# Altium footprint library FootPrintLib_0.PcbLib: 266 footprints (part 14 of 17)
Each footprint in its own frame and in the unit in brackets; x right, y up, seen from the top. Pads: shape width x height; smd on the part's side, far side on the other; paste and mask are expansions set on the pad; w line width, h text height; cw(c..) or ccw(c..) is an arc to the next point about the centre after c.
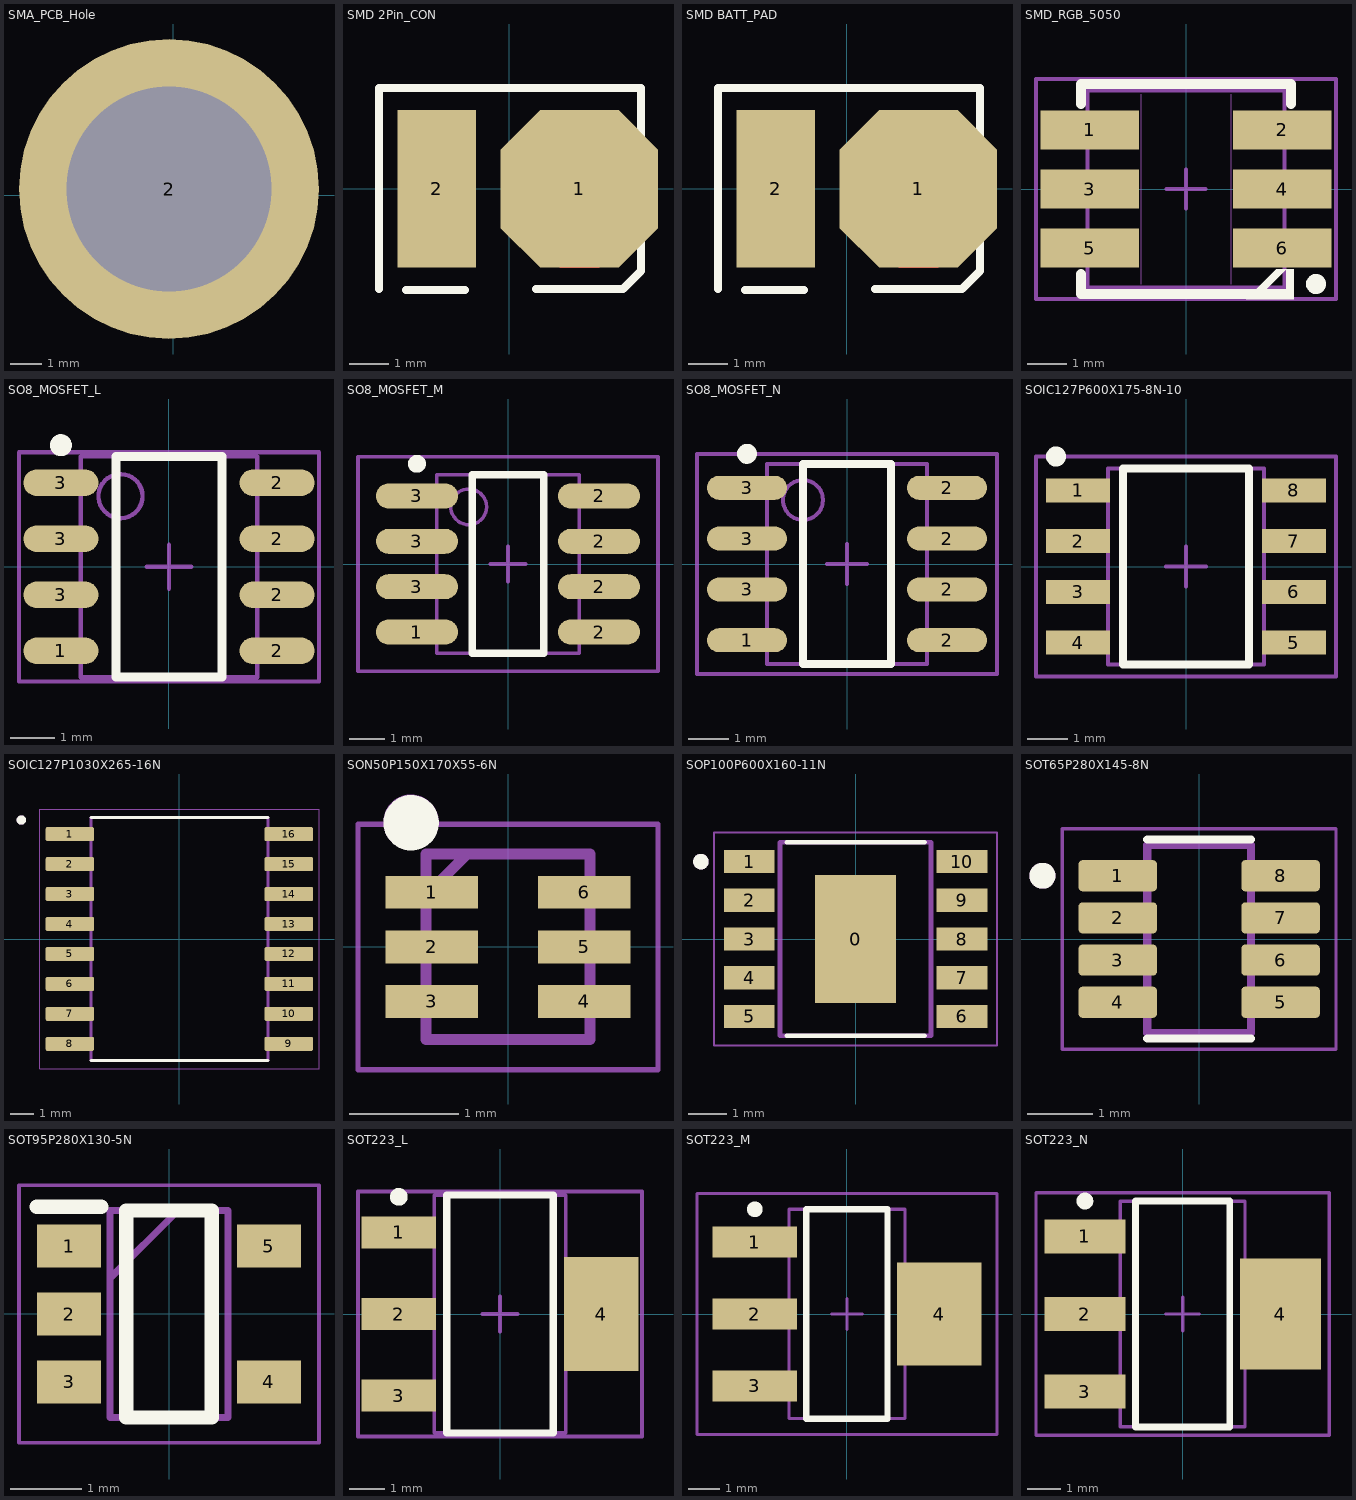
[diagram p13: the footprints below, top view; thin cyan lines are the x and y axes]

## SMA_PCB_Hole [mm]
height 5
pads (1):
  round 9.5 hole 6.5: 2(-0.127,0.203)

## SMD 2Pin_CON [mm]
pads (2):
  oct 4x4 smd: 1(1.784,0)
  rect 2x4 smd: 2(-1.835,0)
Top Layer:
  region: 0.784,-1.5 1.284,-2 2.284,-2 2.784,-1.5 2.784,1.5 2.284,2 1.284,2 0.784,1.5
Top Overlay:
  lines w0.2: -3.302,-2.54 -3.302,2.562 3.353,2.562 3.353,-2.083 2.896,-2.54 0.686,-2.54 ; -2.616,-2.565 -1.118,-2.565
Mechanical 5:
  text "+" at 1.245,-0.737 h1.52

## SMD BATT_PAD [mm]
pads (2):
  oct 4x4 smd: 1(1.81,0)
  rect 2x4 smd: 2(-1.81,0)
Top Layer:
  region: 0.81,-1.5 1.31,-2 2.31,-2 2.81,-1.5 2.81,1.5 2.31,2 1.31,2 0.81,1.5
Top Overlay:
  lines w0.2: -3.277,-2.54 -3.277,2.562 3.378,2.562 3.378,-2.083 2.921,-2.54 0.711,-2.54 ; -2.591,-2.565 -1.092,-2.565
Mechanical 5:
  text "+" at 1.27,-0.737 h1.52

## SMD_RGB_5050 [mm]
pads (6):
  rect 2.5x1 smd: 1(-2.45,1.5) 2(2.45,1.5) 3(-2.45,0) 4(2.45,0) 5(-2.45,-1.5) 6(2.45,-1.5)
Top Overlay:
  circle w0.254: c3.302,-2.413 r0.127
  region: 1.524,-2.794 2.73,-2.794 2.73,-2.032 2.54,-2.032 2.54,-2.54 2.032,-2.54 2.54,-2.032 2.286,-2.032
  lines w0.254: -2.667,-2.159 -2.667,-2.667 1.778,-2.667 ; -2.667,2.159 -2.667,2.667 2.667,2.667 2.667,2.159
Mechanical 13:
  lines w0.02: -1.143,-2.413 -1.143,2.413 ; 1.143,-2.413 1.143,2.413
  lines w0.1: -2.5,-2.5 2.5,-2.5 2.5,2.5 -2.5,2.5 -2.5,-2.5
Mechanical 15:
  lines w0.1: -0.5,0 0.5,0 ; 0,-0.5 0,0.5 ; -3.81,-2.794 -3.81,2.794 3.81,2.794 3.81,-2.794 -3.81,-2.794
3D body "LED SMD 5050 RGB.stp": height 1.67, standoff 0.05, extent -2.741,-2.551 2.659,2.449

## SO8_MOSFET_L [mm] "8-Pin Small Outline Package (SO8), IPC High Density"
height 1.73
pads (8):
  oval 1.7x0.6 smd: 1(-2.45,-1.905) 2(2.45,-1.905) 2(2.45,-0.635) 2(2.45,0.635) 2(2.45,1.905) 3(-2.45,-0.635) 3(-2.45,0.635) 3(-2.45,1.905)
Top Overlay:
  circle w0.25: c-2.45,2.755 r0.125
  lines w0.2: -1.2,-2.5 1.2,-2.5 1.2,2.5 -1.2,2.5 -1.2,-2.5
Mechanical 13:
  circle w0.1: c-1.1,1.6 r0.5
  lines w0.1: -2,-2.5 2,-2.5 2,2.5 -2,2.5 -2,-2.5
Mechanical 15:
  lines w0.1: -0.5,0 0.5,0 ; 0,-0.5 0,0.5 ; -3.4,-2.6 3.4,-2.6 3.4,2.6 -3.4,2.6 -3.4,-2.6
3D body "SO8_narrow.step": height 1.7, standoff 0, extent -3.124,-2.388 3.073,2.438

## SO8_MOSFET_M [mm] "8-Pin Small Outline Package (SO8), IPC Low Density"
height 1.73
pads (8):
  oval 2.3x0.7 smd: 1(-2.55,-1.905) 2(2.55,-1.905) 2(2.55,-0.635) 2(2.55,0.635) 2(2.55,1.905) 3(-2.55,-0.635) 3(-2.55,0.635) 3(-2.55,1.905)
Top Overlay:
  circle w0.25: c-2.55,2.805 r0.125
  lines w0.2: -1,-2.5 1,-2.5 1,2.5 -1,2.5 -1,-2.5
Mechanical 13:
  circle w0.1: c-1.1,1.6 r0.5
  lines w0.1: -2,-2.5 2,-2.5 2,2.5 -2,2.5 -2,-2.5
Mechanical 15:
  lines w0.1: -0.5,0 0.5,0 ; 0,-0.5 0,0.5 ; -4.2,-3 4.2,-3 4.2,3 -4.2,3 -4.2,-3
3D body "SO8_narrow.step": height 1.7, standoff 0, extent -3.124,-2.388 3.073,2.438

## SO8_MOSFET_N [mm] "8-Pin Small Outline Package (SO8), IPC Medium Density"
height 1.73
pads (8):
  oval 2x0.6 smd: 1(-2.5,-1.905) 2(2.5,-1.905) 2(2.5,-0.635) 2(2.5,0.635) 2(2.5,1.905) 3(-2.5,-0.635) 3(-2.5,0.635) 3(-2.5,1.905)
Top Overlay:
  circle w0.25: c-2.5,2.755 r0.125
  lines w0.2: -1.1,-2.5 1.1,-2.5 1.1,2.5 -1.1,2.5 -1.1,-2.5
Mechanical 13:
  circle w0.1: c-1.1,1.6 r0.5
  lines w0.1: -2,-2.5 2,-2.5 2,2.5 -2,2.5 -2,-2.5
Mechanical 15:
  lines w0.1: -0.5,0 0.5,0 ; 0,-0.5 0,0.5 ; -3.75,-2.75 3.75,-2.75 3.75,2.75 -3.75,2.75 -3.75,-2.75
3D body "SO8_narrow.step": height 1.7, standoff 0, extent -3.124,-2.388 3.073,2.438

## SOIC127P600X175-8N-10 [mm] "SOIC,1.27mm pitch;8 pin,3.90mm W X 4.90mm L X 1.75mm H body"
height 1.75
pads (8):
  rect 1.6x0.6 smd paste+0 mask+0: 1(-2.7,1.905) 2(-2.7,0.635) 3(-2.7,-0.635) 4(-2.7,-1.905) 5(2.7,-1.905) 6(2.7,-0.635) 7(2.7,0.635) 8(2.7,1.905)
Top Overlay:
  circle w0.25: c-3.25,2.75 r0.125
  lines w0.2: -1.575,-2.45 -1.575,2.45 1.575,2.45 1.575,-2.45 -1.575,-2.45
Mechanical 3:
Mechanical 13:
  lines w0.1: -1.95,-2.45 -1.95,2.45 1.95,2.45 1.95,-2.45 -1.95,-2.45
Mechanical 15:
  lines w0.1: -0.5,0 0.5,0 ; 0,-0.5 0,0.5 ; -3.75,-2.75 -3.75,2.75 3.75,2.75 3.75,-2.75 -3.75,-2.75
3D body "DSO-8-16.stp": height 1.76, standoff 0, extent -3,-2.5 3,2.5

## SOIC127P1030X265-16N [mm]
pads (16):
  rrect25% 2.06x0.6 smd paste+0 mask+0.102: 1(-4.64,4.445) 2(-4.64,3.175) 3(-4.64,1.905) 4(-4.64,0.635) 5(-4.64,-0.635) 6(-4.64,-1.905) 7(-4.64,-3.175) 8(-4.64,-4.445) 9(4.64,-4.445) 10(4.64,-3.175) 11(4.64,-1.905) 12(4.64,-0.635) 13(4.64,0.635) 14(4.64,1.905) 15(4.64,3.175) 16(4.64,4.445)
Top Overlay:
  circle w0.2: c-6.7,5.045 r0.1
  lines w0.127: -3.75,-5.15 3.75,-5.15 ; -3.75,5.15 3.75,5.15
Mechanical 13:
  circle w0.2: c-6.7,5.045 r0.1
  lines w0.127: -3.75,-5.15 3.75,-5.15 3.75,5.15 -3.75,5.15 -3.75,-5.15
Mechanical 15:
  lines w0.05: -5.92,-5.5 5.92,-5.5 5.92,5.5 -5.92,5.5 -5.92,-5.5
3D body "step_temp.STEP": height 2.65, standoff 0, extent -5.15,-5.15 5.15,5.15

## SON50P150X170X55-6N [mm]
pads (6):
  rect 0.85x0.3 smd: 1(-0.7,0.5) 2(-0.7,0) 3(-0.7,-0.5) 4(0.7,-0.5) 5(0.7,0) 6(0.7,0.5)
Top Overlay:
  circle w0.254: c-0.887,1.138 r0.127
Mechanical 13:
  circle w0.254: c-0.889,1.143 r0.127
  lines w0.05: -1.375,-1.125 1.375,-1.125 1.375,1.125 -1.375,1.125 -1.375,-1.125
  lines w0.1: -0.75,0.475 -0.375,0.85 ; -0.75,-0.85 0.75,-0.85 0.75,0.85 -0.75,0.85 -0.75,-0.85
3D body "QFN-6L.step": height 0.5, standoff 0, extent -0.75,-0.85 0.75,0.85

## SOP100P600X160-11N [mm]
height 1.6
pads (11):
  rect 2.1x3.3 smd paste-3: 0(0,0)
  rect 1.31x0.6 smd: 1(-2.75,2) 2(-2.75,1) 3(-2.75,0) 4(-2.75,-1) 5(-2.75,-2) 6(2.75,-2) 7(2.75,-1) 8(2.75,0) 9(2.75,1) 10(2.75,2)
Top Overlay:
  circle w0.2: c-4,2 r0.1
  lines w0.127: -1.78,-2.5 1.78,-2.5 ; -1.78,2.5 1.78,2.5
Top Paste:
  region: 0.664,-1.044 -0.664,-1.044 -0.664,1.044 0.664,1.044
Mechanical 13:
  circle w0.2: c-4,2 r0.1
  lines w0.127: -1.95,-2.5 1.95,-2.5 1.95,2.5 -1.95,2.5 -1.95,-2.5
Mechanical 15:
  lines w0.05: -3.655,-2.75 3.655,-2.75 3.655,2.75 -3.655,2.75 -3.655,-2.75
3D body "step_temp.STEP": height 1.6, standoff 0, extent -3,-2.5 3,2.5

## SOT65P280X145-8N [mm]
pads (8):
  rrect25% 1.21x0.48 smd: 1(-1.255,0.975) 2(-1.255,0.325) 3(-1.255,-0.325) 4(-1.255,-0.975) 5(1.255,-0.975) 6(1.255,-0.325) 7(1.255,0.325) 8(1.255,0.975)
Top Overlay:
  circle w0.2: c-2.415,0.975 r0.1
  lines w0.127: -0.8,-1.535 0.8,-1.535 ; -0.8,1.535 0.8,1.535
Mechanical 13:
  circle w0.2: c-2.415,0.975 r0.1
  lines w0.127: -0.8,-1.45 0.8,-1.45 0.8,1.45 -0.8,1.45 -0.8,-1.45
Mechanical 15:
  lines w0.05: -2.11,-1.7 2.11,-1.7 2.11,1.7 -2.11,1.7 -2.11,-1.7
3D body "step_temp.STEP": height 1.45, standoff 0, extent -1.4,-1.45 1.4,1.45

## SOT95P280X130-5N [mm]
pads (5):
  rect 0.9x0.6 smd: 1(-1.4,0.95) 2(-1.4,0) 3(-1.4,-0.95) 4(1.4,-0.95) 5(1.4,0.95)
Top Overlay:
  lines w0.2: -1.85,1.5 -0.95,1.5 ; -0.6,-1.45 0.6,-1.45 0.6,1.45 -0.6,1.45 -0.6,-1.45
Mechanical 13:
  lines w0.1: -0.825,0.5 0.125,1.45 ; -0.825,-1.45 0.825,-1.45 0.825,1.45 -0.825,1.45 -0.825,-1.45
Mechanical 15:
  lines w0.05: -2.1,-1.8 2.1,-1.8 2.1,1.8 -2.1,1.8 -2.1,-1.8
3D body "XC6209F332MR-G.stp": height 1.3, standoff 0, extent -1.4,-1.45 1.4,1.45

## SOT223_L [mm] "SOT223, 4-Leads, Body 6.5x3.5mm, Pitch 2.3mm, Lead Span 7mm, IPC High Density"
height 1.7
pads (4):
  rect 2.1x0.9 smd: 1(-2.85,2.3) 2(-2.85,0) 3(-2.85,-2.3)
  rect 2.1x3.2 smd: 4(2.85,0)
Top Overlay:
  circle w0.25: c-2.85,3.3 r0.125
  lines w0.2: -1.5,-3.35 1.5,-3.35 1.5,3.35 -1.5,3.35 -1.5,-3.35
Mechanical 13:
  lines w0.1: -1.85,-3.35 1.85,-3.35 1.85,3.35 -1.85,3.35 -1.85,-3.35
Mechanical 15:
  lines w0.1: -0.5,0 0.5,0 ; 0,-0.5 0,0.5 ; -4,-3.45 4,-3.45 4,3.45 -4,3.45 -4,-3.45
3D body "User Library-SOT-223-2.STEP": height 1.85, standoff -0.05, extent -3.458,-3.379 3.746,3.321

## SOT223_M [mm] "SOT223, 4-Leads, Body 6.5x3.5mm, Pitch 2.3mm, Lead Span 7mm, IPC Low Density"
height 1.7
pads (4):
  rect 2.7x1 smd: 1(-2.95,2.3) 2(-2.95,0) 3(-2.95,-2.3)
  rect 2.7x3.3 smd: 4(2.95,0)
Top Overlay:
  circle w0.25: c-2.95,3.35 r0.125
  lines w0.2: -1.3,-3.35 -1.3,3.35 1.3,3.35 1.3,-3.35 -1.3,-3.35
Mechanical 13:
  lines w0.1: -1.85,-3.35 -1.85,3.35 1.85,3.35 1.85,-3.35 -1.85,-3.35
Mechanical 15:
  lines w0.1: -0.5,0 0.5,0 ; 0,-0.5 0,0.5 ; -4.8,-3.85 -4.8,3.85 4.8,3.85 4.8,-3.85 -4.8,-3.85
3D body "User Library-SOT-223-2.STEP": height 1.85, standoff -0.05, extent -3.42,-3.379 3.784,3.321

## SOT223_N [mm] "SOT223, 4-Leads, Body 6.5x3.5mm, Pitch 2.3mm, Lead Span 7mm, IPC Medium Density"
height 1.7
pads (4):
  rect 2.4x1 smd: 1(-2.9,2.3) 2(-2.9,0) 3(-2.9,-2.3)
  rect 2.4x3.3 smd: 4(2.9,0)
Top Overlay:
  circle w0.25: c-2.9,3.35 r0.125
  lines w0.2: -1.4,-3.35 -1.4,3.35 1.4,3.35 1.4,-3.35 -1.4,-3.35
Mechanical 13:
  lines w0.1: -1.85,-3.35 -1.85,3.35 1.85,3.35 1.85,-3.35 -1.85,-3.35
Mechanical 15:
  lines w0.1: -0.5,0 0.5,0 ; 0,-0.5 0,0.5 ; -4.35,-3.6 -4.35,3.6 4.35,3.6 4.35,-3.6 -4.35,-3.6
3D body "User Library-SOT-223-2.STEP": height 1.85, standoff -0.05, extent -3.395,-3.379 3.809,3.321